# Altium footprint library IC_SMD_DUAL.PcbLib: 184 footprints (part 11 of 12)
Each footprint in its own frame and in the unit in brackets; x right, y up, seen from the top. Pads: shape width x height; smd on the part's side, far side on the other; paste and mask are expansions set on the pad; w line width, h text height; cw(c..) or ccw(c..) is an arc to the next point about the centre after c.
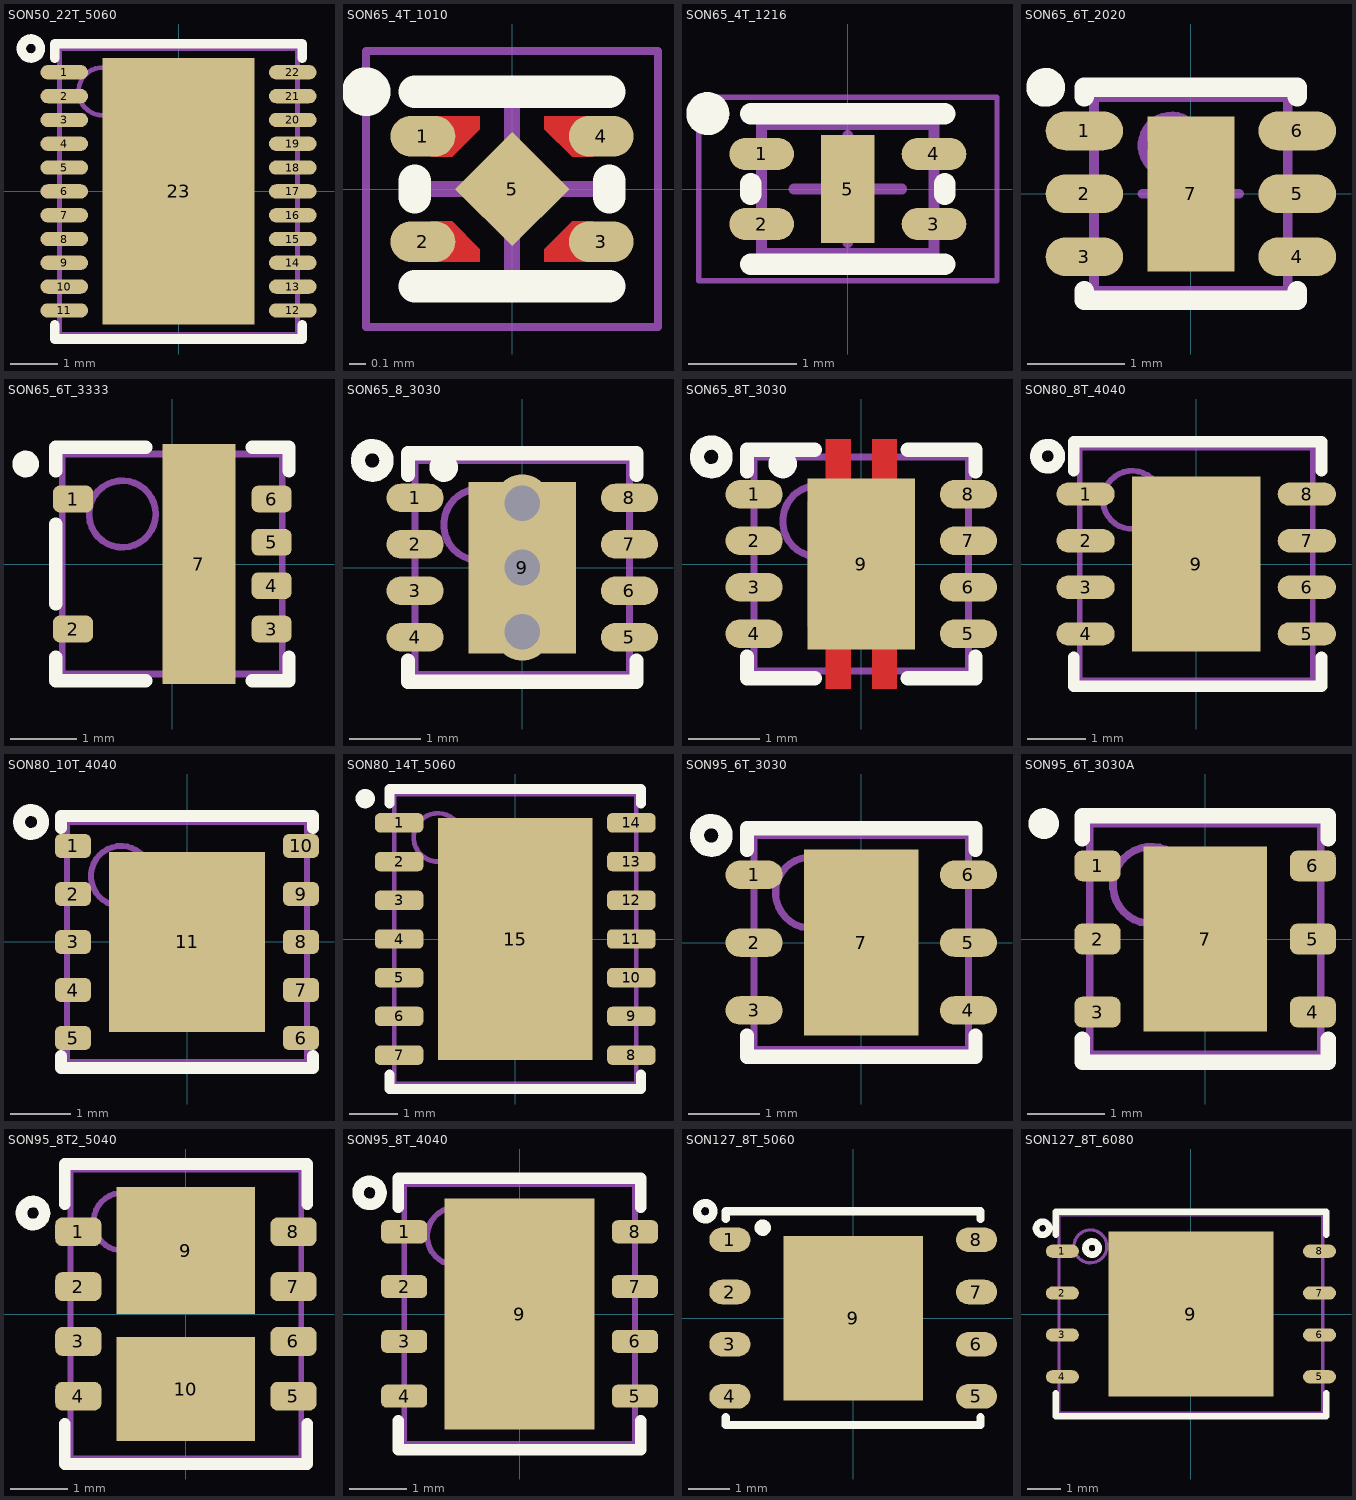
[diagram p10: the footprints below, top view; thin cyan lines are the x and y axes]

## SON50_22T_5060 [mm] "DQP, PQFN-22, SON-22, 5X6X1.5mm, 0.5mm pitch"
height 1.5
pads (23):
  oval 1x0.3 smd mask+0.075: 1(-2.4,2.5) 2(-2.4,2) 3(-2.4,1.5) 4(-2.4,1) 5(-2.4,0.5) 6(-2.4,0) 7(-2.4,-0.5) 8(-2.4,-1) 9(-2.4,-1.5) 10(-2.4,-2) 11(-2.4,-2.5) 12(2.4,-2.5) 13(2.4,-2) 14(2.4,-1.5) 15(2.4,-1) 16(2.4,-0.5) 17(2.4,0) 18(2.4,0.5) 19(2.4,1) 20(2.4,1.5) 21(2.4,2) 22(2.4,2.5)
  rect 3.2x5.6 smd paste-1.6: 23(0,0)
Top Overlay:
  circle w0.2: c-3.1,3 r0.2
  lines w0.2: -2.6,-2.8 -2.6,-3.1 2.6,-3.1 2.6,-2.8 ; -2.6,2.8 -2.6,3.1 2.6,3.1 2.6,2.8
Top Paste:
  rectangle: 0.1,-2.6 1.5,-1.45
  rectangle: 0.1,-1.25 1.5,-0.1
  rectangle: 0.1,0.1 1.5,1.25
  rectangle: 0.1,1.45 1.5,2.6
  rectangle: -1.5,-2.6 -0.1,-1.45
  rectangle: -1.5,-1.25 -0.1,-0.1
  rectangle: -1.5,0.1 -0.1,1.25
  rectangle: -1.5,1.45 -0.1,2.6
Top Designator:
  text ".Designator" at -3.923,-0.294 h1.52
Mechanical 13:
  circle w0.1: c-1.6,2.1 r0.5
  lines w0.1: -2.5,-3 2.5,-3 2.5,3 -2.5,3 -2.5,-3
3D body "SON127P600-8N.step": height 1.5, standoff 0, extent -2.501,-3 2.501,3

## SON65_4T_1010 [mm] "X2SON, DQN, DFN(PLP)1010-4, DFN1010C-4, 1.0X1.0mm, 0.65mm pitch"
height 0.6
pads (5):
  oval 0.4x0.25 smd mask+0.05: 1(-0.55,0.325) 2(-0.55,-0.325) 3(0.55,-0.325) 4(0.55,0.325)
  rect 0.5x0.5 smd rot 45 mask+0.05: 5(0,0)
Top Layer:
  region: -0.5,0.45 -0.2,0.45 -0.2,0.37 -0.37,0.2 -0.5,0.2
  region: -0.5,-0.45 -0.2,-0.45 -0.2,-0.37 -0.37,-0.2 -0.5,-0.2
  region: 0.5,-0.45 0.2,-0.45 0.2,-0.37 0.37,-0.2 0.5,-0.2
  region: 0.5,0.45 0.2,0.45 0.2,0.37 0.37,0.2 0.5,0.2
Top Overlay:
  circle w0.2: c-0.9,0.6 r0.05
  lines w0.2: -0.6,-0.6 0.6,-0.6 ; -0.6,-0.05 -0.6,0.05 ; -0.6,0.6 0.6,0.6 ; 0.6,-0.05 0.6,0.05
Top Solder:
  region: -0.5,0.5 -0.15,0.5 -0.15,0.37 -0.37,0.15 -0.5,0.15
  region: -0.5,-0.5 -0.15,-0.5 -0.15,-0.37 -0.37,-0.15 -0.5,-0.15
  region: 0.5,-0.5 0.15,-0.5 0.15,-0.37 0.37,-0.15 0.5,-0.15
  region: 0.5,0.5 0.15,0.5 0.15,0.37 0.37,0.15 0.5,0.15
Top Designator:
  text ".Designator" at -3.773,-0.344 h1.52
Mechanical 15:
  lines w0.05: -0.9,-0.85 0.9,-0.85 0.9,0.85 -0.9,0.85 -0.9,-0.85
  lines w0.1: -0.5,0 0.5,0 ; 0,-0.5 0,0.5
3D body: height 0.2, standoff 0, extent 0.2,0.2 0.51,0.45
3D body: height 0.2, standoff 0, extent 0.2,-0.45 0.51,-0.2
3D body: height 0.2, standoff 0, extent -0.51,-0.45 -0.2,-0.2
3D body: height 0.61, standoff 0.6, extent -0.4,0.2 -0.2,0.4
3D body: height 0.6, standoff 0.01, extent -0.5,-0.5 0.5,0.5
3D body: height 0.1, standoff 0, extent -0.354,-0.353 0.354,0.354
3D body: height 0.2, standoff 0, extent -0.51,0.2 -0.2,0.45

## SON65_4T_1216 [mm] "DFN4-1216-0.65, DFN(PLP)1612-4, 1.2X1.6mm, 0.65mm pitch"
height 0.6
pads (5):
  oval 0.6x0.3 smd mask+0.075: 1(-0.8,0.325) 2(-0.8,-0.325) 3(0.8,-0.325) 4(0.8,0.325)
  rect 0.5x1 smd paste-0.05 mask+0.05: 5(0,0)
Top Overlay:
  circle w0.2: c-1.3,0.7 r0.1
  lines w0.2: -0.9,-0.7 0.9,-0.7 ; -0.9,-0.05 -0.9,0.05 ; -0.9,0.7 0.9,0.7 ; 0.9,-0.05 0.9,0.05
Top Designator:
  text ".Designator" at -3.755,-0.331 h1.52
Mechanical 13:
  lines w0.1: -0.8,-0.6 0.8,-0.6 0.8,0.6 -0.8,0.6 -0.8,-0.6
Mechanical 15:
  lines w0.05: -1.385,-0.85 1.385,-0.85 1.385,0.85 -1.385,0.85 -1.385,-0.85
  lines w0.1: -0.5,0 0.5,0 ; 0,-0.5 0,0.5
3D body "User Library-DFN4-1216-0.step": height 0.5, standoff 0, extent -0.8,-0.6 0.8,0.6

## SON65_6T_2020 [mm] "DRV PWSON DFN6 Pitch: 0.65mm 2x2x1.1mm"
height 1.1
pads (7):
  oval 0.8x0.4 smd paste-0.05 mask+0.075: 1(-1.1,0.65) 2(-1.1,0) 3(-1.1,-0.65) 4(1.1,-0.65) 5(1.1,0) 6(1.1,0.65)
  rect 0.9x1.6 smd paste-0.05 mask+0.075: 7(0,0)
Top Overlay:
  circle w0.2: c-1.5,1.1 r0.1
  lines w0.2: -1.1,-1 -1.1,-1.1 1.1,-1.1 1.1,-1 ; -1.1,1 -1.1,1.1 1.1,1.1 1.1,1
Top Designator:
  text ".Designator" at -3.773,-0.294 h1.52
Mechanical 13:
  circle w0.1: c-0.2,0.5 r0.3
  lines w0.1: -1,-1 1,-1 1,1 -1,1 -1,-1
Mechanical 15:
  lines w0.1: -0.5,0 0.5,0 ; 0,-0.5 0,0.5
3D body "SON65_6T_S200.step": height 0.75, standoff 0, extent -1.001,-1 1.001,1

## SON65_6T_3333 [mm] "506DF, DFN6 3.3x3.3, 0.65P"
height 0.9
pads (7):
  rrect50% 0.6x0.4 smd mask+0.075: 1(-1.49,0.975) 2(-1.49,-0.975) 3(1.49,-0.975) 4(1.49,-0.325) 5(1.49,0.325) 6(1.49,0.975)
  rect 1.1x3.6 smd paste-5 mask+0.075: 7(0.4,0)
Top Overlay:
  circle w0.2: c-2.2,1.5 r0.1
  lines w0.2: -1.75,-1.4 -1.75,-1.75 -0.4,-1.75 ; -1.75,-0.6 -1.75,0.6 ; -1.75,1.4 -1.75,1.75 -0.4,1.75 ; 1.2,-1.75 1.75,-1.75 1.75,-1.4 ; 1.2,1.75 1.75,1.75 1.75,1.4
Top Paste:
  rectangle: 0,-1.6 0.8,-0.2
  rectangle: 0,0.2 0.8,1.6
Top Designator:
  text ".Designator" at -3.978,-0.344 h1.52
Mechanical 13:
  circle w0.1: c-0.75,0.75 r0.5
  lines w0.1: -1.65,-1.65 -1.65,1.65 1.65,1.65 1.65,-1.65 -1.65,-1.65
3D body "SON65_6_3333.step": height 0.9, standoff 0, extent -1.651,-1.65 1.651,1.65

## SON65_8_3030 [mm] "LFCSP_WD, CP-8-15, 3.00x3.00mm, Pitch 0.65mm"
height 1
pads (9):
  oval 0.8x0.4 smd mask+0.075: 1(-1.5,0.975) 2(-1.5,0.325) 3(-1.5,-0.325) 4(-1.5,-0.975) 5(1.5,-0.975) 6(1.5,-0.325) 7(1.5,0.325) 8(1.5,0.975)
  rect 1.5x2.4 smd: 9(0,0)
via 0,0 diameter 0.8 hole 0.5
via 0,0.9 diameter 0.8 hole 0.5
via 0,-0.9 diameter 0.8 hole 0.5
Top Overlay:
  circle w0.2: c-2.1,1.5 r0.2
  circle w0.2: c-1.1,1.4 r0.1
  lines w0.2: -1.6,-1.3 -1.6,-1.6 1.6,-1.6 1.6,-1.3 ; -1.6,1.3 -1.6,1.6 1.6,1.6 1.6,1.3
Top Designator:
  text ".Designator" at -3.923,-0.294 h1.52
Mechanical 13:
  circle w0.1: c-0.6,0.6 r0.5
  lines w0.1: -1.5,-1.5 -1.5,1.5 1.5,1.5 1.5,-1.5 -1.5,-1.5
3D body: height 1, standoff 0.05, extent -1.5,-1.5 1.5,1.5
3D body: height 0.2, standoff 0, extent -1.575,-1.125 -1.075,-0.825
3D body: height 0.2, standoff 0, extent -1.575,-0.475 -1.075,-0.175
3D body: height 0.2, standoff 0, extent -1.575,0.175 -1.075,0.475
3D body: height 0.2, standoff 0, extent -1.575,0.825 -1.075,1.125
3D body: height 1.01, standoff 1, extent -1.4,1 -1,1.4
3D body: height 0.2, standoff 0, extent 1.075,0.825 1.575,1.125
3D body: height 0.2, standoff 0, extent 1.075,0.175 1.575,0.475
3D body: height 0.2, standoff 0, extent 1.075,-0.475 1.575,-0.175
3D body: height 0.2, standoff 0, extent 1.075,-1.125 1.575,-0.825

## SON65_8T_3030 [mm] "DRB PVSON8 (TI), 3.00x3.00mm, Pitch 0.65mm"
height 1
pads (9):
  oval 0.8x0.4 smd paste-0.05 mask+0.075: 1(-1.5,0.975) 2(-1.5,0.325) 3(-1.5,-0.325) 4(-1.5,-0.975) 5(1.5,-0.975) 6(1.5,-0.325) 7(1.5,0.325) 8(1.5,0.975)
  rect 1.5x2.4 smd paste-1.2: 9(0,0)
Top Layer:
  region: -0.5,-1.75 -0.5,-0.875 -0.75,-0.875 -0.75,0.875 -0.5,0.875 -0.5,1.75 -0.15,1.75 -0.15,0.875 0.15,0.875 0.15,1.75 0.5,1.75 0.5,0.875 0.75,0.875 0.75,-0.875 0.5,-0.875 0.5,-1.75 0.15,-1.75 0.15,-0.875 -0.15,-0.875 -0.15,-1.75
Top Overlay:
  circle w0.2: c-2.1,1.5 r0.2
  circle w0.2: c-1.1,1.4 r0.1
  lines w0.2: -1.6,-1.3 -1.6,-1.6 -0.65,-1.6 ; -1.6,1.3 -1.6,1.6 -0.65,1.6 ; 0.65,-1.6 1.6,-1.6 1.6,-1.3 ; 0.65,1.6 1.6,1.6 1.6,1.3
Top Paste:
  rectangle: -0.6,-1 0.6,-0.2
  rectangle: -0.5,-1.75 -0.15,-1.3
  region: 0.5,-1.3 0.15,-1.3 0.15,-1.75 0.5,-1.75
  region: 0.5,1.75 0.15,1.75 0.15,1.3 0.5,1.3
  rectangle: -0.5,1.3 -0.15,1.75
  rectangle: -0.6,0.2 0.6,1
Top Solder:
  region: -0.55,-1.8 -0.55,-0.875 -0.75,-0.875 -0.75,0.875 -0.55,0.875 -0.55,1.8 -0.1,1.8 -0.1,0.875 0.1,0.875 0.1,1.8 0.55,1.8 0.55,0.875 0.75,0.875 0.75,-0.875 0.55,-0.875 0.55,-1.8 0.1,-1.8 0.1,-0.875 -0.1,-0.875 -0.1,-1.8
Top Designator:
  text ".Designator" at -3.923,-0.344 h1.52
Mechanical 13:
  circle w0.1: c-0.6,0.6 r0.5
  lines w0.1: -1.5,-1.5 -1.5,1.5 1.5,1.5 1.5,-1.5 -1.5,-1.5
3D body "DRB0008A.stp": height 0.77, standoff 0, extent -1.5,-1.5 1.5,1.5

## SON80_8T_4040 [mm] "SON, DFN8, WSON-8, 8-Leads, Body 4x4mm, Pitch 0.80mm"
height 1
pads (9):
  oval 1x0.4 smd: 1(-1.9,1.2) 2(-1.9,0.4) 3(-1.9,-0.4) 4(-1.9,-1.2) 5(1.9,-1.2) 6(1.9,-0.4) 7(1.9,0.4) 8(1.9,1.2)
  rect 2.2x3 smd paste-1.1: 9(0,0)
Top Overlay:
  circle w0.2: c-2.55,1.85 r0.2
  lines w0.2: -2.1,-1.6 -2.1,-2.1 2.15,-2.1 2.15,-1.6 ; -2.1,1.6 -2.1,2.1 2.15,2.1 2.15,1.6
Top Paste:
  rectangle: -1,0.1 -0.1,1.4
  rectangle: -1,-1.4 -0.1,-0.1
  rectangle: 0.1,0.1 1,1.4
  rectangle: 0.1,-1.4 1,-0.1
Top Designator:
  text ".Designator" at -3.885,-0.344 h1.52
Mechanical 13:
  circle w0.1: c-1.1,1.1 r0.5
  lines w0.1: -2,-2 -2,2 2,2 2,-2 -2,-2
3D body: height 1, standoff 0, extent -2,-2 2,2

## SON80_10T_4040 [mm] "DPR WSON10, 10-Leads, 4x4mm, Pitch 0.80mm"
height 0.8
pads (11):
  rrect50% 0.6x0.4 smd mask+0.075: 1(-1.9,1.6) 2(-1.9,0.8) 3(-1.9,0) 4(-1.9,-0.8) 5(-1.9,-1.6) 6(1.9,-1.6) 7(1.9,-0.8) 8(1.9,0) 9(1.9,0.8) 10(1.9,1.6)
  rect 2.6x3 smd paste-1.3: 11(0,0)
Top Overlay:
  circle w0.2: c-2.6,2 r0.2
  lines w0.2: -2.1,-1.9 -2.1,-2.1 2.1,-2.1 2.1,-1.9 ; -2.1,1.9 -2.1,2.1 2.1,2.1 2.1,1.9
Top Paste:
  rectangle: 0.1,-1.4 1.2,-0.1
  rectangle: 0.1,0.1 1.2,1.4
  rectangle: -1.2,-1.4 -0.1,-0.1
  rectangle: -1.2,0.1 -0.1,1.4
Top Designator:
  text ".Designator" at -4.023,-0.294 h1.52
Mechanical 13:
  circle w0.1: c-1.1,1.1 r0.5
  lines w0.1: -2,-2 2,-2 2,2 -2,2 -2,-2
3D body "SON80_10T.step": height 0.8, standoff 0, extent -2.001,-2 2.001,2

## SON80_14T_5060 [mm] "NHM VSON, 0.8mm pitch, 5X6mm"
height 1
pads (15):
  rrect50% 1x0.4 smd mask+0.1: 1(-2.4,2.4) 2(-2.4,1.6) 3(-2.4,0.8) 4(-2.4,0) 5(-2.4,-0.8) 6(-2.4,-1.6) 7(-2.4,-2.4) 8(2.4,-2.4) 9(2.4,-1.6) 10(2.4,-0.8) 11(2.4,0) 12(2.4,0.8) 13(2.4,1.6) 14(2.4,2.4)
  rect 3.2x5 smd paste-1.6: 15(0,0)
Top Overlay:
  circle w0.2: c-3.1,2.9 r0.1
  lines w0.2: -2.6,-2.8 -2.6,-3.1 2.6,-3.1 2.6,-2.8 ; -2.6,2.8 -2.6,3.1 2.6,3.1 2.6,2.8
Top Paste:
  rectangle: -1.5,1.35 -0.1,2.4
  rectangle: -1.5,0.1 -0.1,1.15
  rectangle: -1.5,-1.15 -0.1,-0.1
  rectangle: -1.5,-2.4 -0.1,-1.35
  rectangle: 0.1,1.35 1.5,2.4
  rectangle: 0.1,0.1 1.5,1.15
  rectangle: 0.1,-1.15 1.5,-0.1
  rectangle: 0.1,-2.4 1.5,-1.35
Top Designator:
  text ".Designator" at -3.86,-0.344 h1.52
Mechanical 13:
  circle w0.1: c-1.6,2.1 r0.5
  lines w0.1: -2.5,-3 -2.5,3 2.5,3 2.5,-3 -2.5,-3
3D body "SON80_14T_.step": height 1, standoff 0, extent -2.501,-3 2.501,3

## SON95_6T_3030 [mm] "Pitch: 0.95mm 3x3x1.1mm"
height 1.1
pads (7):
  oval 0.8x0.4 smd: 1(-1.5,0.95) 2(-1.5,0) 3(-1.5,-0.95) 4(1.5,-0.95) 5(1.5,0) 6(1.5,0.95)
  rect 1.6x2.6 smd paste-3: 7(0,0)
Top Overlay:
  circle w0.2: c-2.1,1.5 r0.2
  lines w0.2: -1.6,-1.3 -1.6,-1.6 1.6,-1.6 1.6,-1.3 ; -1.6,1.3 -1.6,1.6 1.6,1.6 1.6,1.3
Top Paste:
  rectangle: -0.7,0.2 -0.1,1.2
  rectangle: -0.7,-1.2 -0.1,-0.2
  rectangle: 0.1,0.2 0.7,1.2
  rectangle: 0.1,-1.2 0.7,-0.2
Top Designator:
  text ".Designator" at -3.91,-0.294 h1.52
Mechanical 13:
  circle w0.1: c-0.7,0.7 r0.5
  lines w0.1: -1.5,-1.5 1.5,-1.5 1.5,1.5 -1.5,1.5 -1.5,-1.5
Mechanical 15:
  lines w0.1: -0.5,0 0.5,0 ; 0,-0.5 0,0.5
3D body "User Library-dfn6_3x3_rm0_95.step": height 0.8, standoff 0, extent -1.55,-1.5 1.55,1.5

## SON95_6T_3030A [mm] "Pitch: 0.95mm 3x3x1.1mm"
height 1.1
pads (7):
  rrect50% 0.6x0.4 smd mask+0.075: 1(-1.4,0.95) 2(-1.4,0) 3(-1.4,-0.95) 4(1.4,-0.95) 5(1.4,0) 6(1.4,0.95)
  rect 1.6x2.4 smd paste-3: 7(0,0)
Top Overlay:
  circle w0.2: c-2.1,1.5 r0.1
  lines w0.2: -1.6,-1.3 -1.6,-1.6 1.6,-1.6 1.6,-1.3 ; -1.6,1.3 -1.6,1.6 1.6,1.6 1.6,1.3
Top Paste:
  rectangle: -0.7,0.1 -0.1,1.1
  rectangle: -0.7,-1.1 -0.1,-0.1
  rectangle: 0.1,0.1 0.7,1.1
  rectangle: 0.1,-1.1 0.7,-0.1
Top Designator:
  text ".Designator" at -3.973,-0.344 h1.52
Mechanical 13:
  circle w0.1: c-0.7,0.7 r0.5
  lines w0.1: -1.5,-1.5 1.5,-1.5 1.5,1.5 -1.5,1.5 -1.5,-1.5
Mechanical 15:
  lines w0.1: -0.5,0 0.5,0 ; 0,-0.5 0,0.5
3D body "User Library-dfn6_3x3_rm0_95.step": height 0.8, standoff 0, extent -1.55,-1.5 1.55,1.5

## SON95_8T2_5040 [mm] "5x4A DFN-8, 0.95mm pitch, 5X4X0.8mm"
height 0.8
pads (10):
  rrect50% 0.8x0.5 smd mask+0.075: 1(-1.865,1.425) 2(-1.865,0.475) 3(-1.865,-0.475) 4(-1.865,-1.425) 5(1.865,-1.425) 6(1.865,-0.475) 7(1.865,0.475) 8(1.865,1.425)
  rect 2.4x2.2 smd paste-1.19 mask+0.075: 9(0,1.1)
  rect 2.4x1.8 smd paste-1.19 mask+0.075: 10(0,-1.3)
Top Overlay:
  circle w0.2: c-2.65,1.75 r0.2
  lines w0.2: -2.1,-1.9 -2.1,-2.6 2.1,-2.6 2.1,-1.9 ; -2.1,1.9 -2.1,2.6 2.1,2.6 2.1,1.9
Top Paste:
  rectangle: 0.1,0.1 1.1,0.5
  region: -0.1,0.5 -1.1,0.5 -1.1,0.1 -0.1,0.1
  region: -0.1,-1.4 -1.1,-1.4 -1.1,-2.1 -0.1,-2.1
  region: -0.1,-0.5 -1.1,-0.5 -1.1,-1.2 -0.1,-1.2
  rectangle: 0.1,-1.2 1.1,-0.5
  rectangle: 0.1,-2.1 1.1,-1.4
  region: -0.1,1.5 -1.1,1.5 -1.1,0.7 -0.1,0.7
  rectangle: 0.1,0.7 1.1,1.5
  region: -0.1,2.1 -1.1,2.1 -1.1,1.7 -0.1,1.7
  rectangle: 0.1,1.7 1.1,2.1
Top Designator:
  text ".Designator" at -4.015,-0.344 h1.52
Mechanical 13:
  circle w0.1: c-1.1,1.6 r0.5
  lines w0.1: -2,-2.5 2,-2.5 2,2.5 -2,2.5 -2,-2.5
3D body "SON95_8T2_5040.step": height 0.8, standoff 0, extent -2.001,-2.5 2.001,2.5

## SON95_8T_4040 [mm] "DFN-8, SON, pitch 0.95mm, 4X4.5X0.75mm"
height 0.75
pads (9):
  rrect50% 0.8x0.4 smd: 1(-2,1.425) 2(-2,0.475) 3(-2,-0.475) 4(-2,-1.425) 5(2,-1.425) 6(2,-0.475) 7(2,0.475) 8(2,1.425)
  rect 2.6x4 smd paste-4: 9(0,0)
Top Overlay:
  circle w0.2: c-2.6,2.1 r0.2
  lines w0.2: -2.1,-1.85 -2.1,-2.35 2.1,-2.35 2.1,-1.85 ; -2.1,1.85 -2.1,2.35 2.1,2.35 2.1,1.85
Top Paste:
  rectangle: 0.2,-1.8 1.1,-0.2
  region: -0.2,-0.2 -1.1,-0.2 -1.1,-1.8 -0.2,-1.8
  region: -0.2,1.8 -1.1,1.8 -1.1,0.2 -0.2,0.2
  rectangle: 0.2,0.2 1.1,1.8
Top Designator:
  text ".Designator" at -3.91,-0.344 h1.52
Mechanical 13:
  circle w0.1: c-1.1,1.35 r0.5
  lines w0.1: -2,-2.25 2,-2.25 2,2.25 -2,2.25 -2,-2.25
3D body "SON127P600-8N.step": height 0.75, standoff 0, extent -2.05,-2.25 2.05,2.25

## SON127_8T_5060 [mm] "WSON8_6X5"
pads (9):
  oval 1x0.6 smd: 1(-3,1.905) 2(-3,0.635) 3(-3,-0.635) 4(-3,-1.905) 5(3,-1.905) 6(3,-0.635) 7(3,0.635) 8(3,1.905)
  rect 3.4x4 smd paste-5: 9(0,0)
Top Overlay:
  circle w0.2: c-3.6,2.6 r0.2
  circle w0.2: c-2.2,2.2 r0.1
  lines w0.2: -3.1,-2.413 -3.1,-2.6 3.1,-2.6 3.1,-2.413 ; -3.1,2.413 -3.1,2.6 3.1,2.6 3.1,2.413
Top Paste:
  rectangle: -1.5,0.2 -0.2,1.8
  region: 1.5,1.8 0.2,1.8 0.2,0.2 1.5,0.2
  region: 1.5,-0.2 0.2,-0.2 0.2,-1.8 1.5,-1.8
  rectangle: -1.5,-1.8 -0.2,-0.2
Top Designator:
  text ".Designator" at -3.86,-0.244 h1.52
3D body "SON127P600-8N.step": height 1, standoff 0, extent -3.05,-2.5 3.05,2.5

## SON127_8T_6080 [mm] "WSON 8, 6X8, pitch: 1.27mm"
height 0.8
pads (9):
  oval 1x0.4 smd: 1(-3.9,1.905) 2(-3.9,0.635) 3(-3.9,-0.635) 4(-3.9,-1.905) 5(3.9,-1.905) 6(3.9,-0.635) 7(3.9,0.635) 8(3.9,1.905)
  rect 5x5 smd paste-5: 9(0,0)
Top Overlay:
  circle w0.2: c-4.5,2.6 r0.2
  circle w0.2: c-3,2 r0.2
  lines w0.2: -4.1,-2.4 -4.1,-3.1 4.1,-3.1 4.1,-2.4 ; -4.1,2.4 -4.1,3.1 4.1,3.1 4.1,2.4
Top Paste:
  region: 2,-1.9 2,-0.9 1,-0.9 1,-1.9
  region: 2,-0.5 2,0.5 1,0.5 1,-0.5
  region: 0.5,-1.9 0.5,-0.9 -0.5,-0.9 -0.5,-1.9
  region: 0.5,-0.5 0.5,0.5 -0.5,0.5 -0.5,-0.5
  region: -0.9,-1.9 -0.9,-0.9 -1.9,-0.9 -1.9,-1.9
  region: -0.9,-0.5 -0.9,0.5 -1.9,0.5 -1.9,-0.5
  rectangle: 1,1 2,2
  rectangle: -0.5,1 0.5,2
  rectangle: -1.9,1 -0.9,2
Top Designator:
  text ".Designator" at -3.86,-0.344 h1.52
Mechanical 13:
  circle w0.1: c-3.05,2.05 r0.5
  lines w0.1: -4,-3 -4,3 4,3 4,-3 -4,-3
3D body "User Library-WSON-8_6x8mm.STEP": height 0.81, standoff -0.07, extent -4,-3 4,3